# Altium schematic symbol library TPS2553DBVR.SchLib: 1 symbol
Pins are listed as number, name and electrical type; pins without a type are passive.

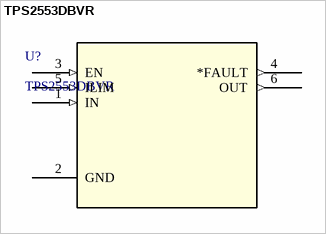
[diagram p0: symbol TPS2553DBVR]

## TPS2553DBVR
designator U?
0.075-1.7A adj. ILIMIT,  2.5-6.5V, 85mÎ© USB power switch, active-high, reverse blocking 6-SOT-23 -40 to 125; Manufacturer_Name: Texas Instruments; Copyright: Copyright (C) 2026 Ultra Librarian. All rights reserved.; Manufacturer_Part_Number: TPS2553DBVR; RefDes: RefDes; Type: Type
footprint DBV6
pins: 1 IN (in), 2 GND (power), 3 EN (in), 4 *FAULT (out), 5 ILIM (in), 6 OUT (out)